# Altium schematic symbol library simple_clock.SCHLIB: 21 symbols
Pins are listed as number, name and electrical type; pins without a type are passive.

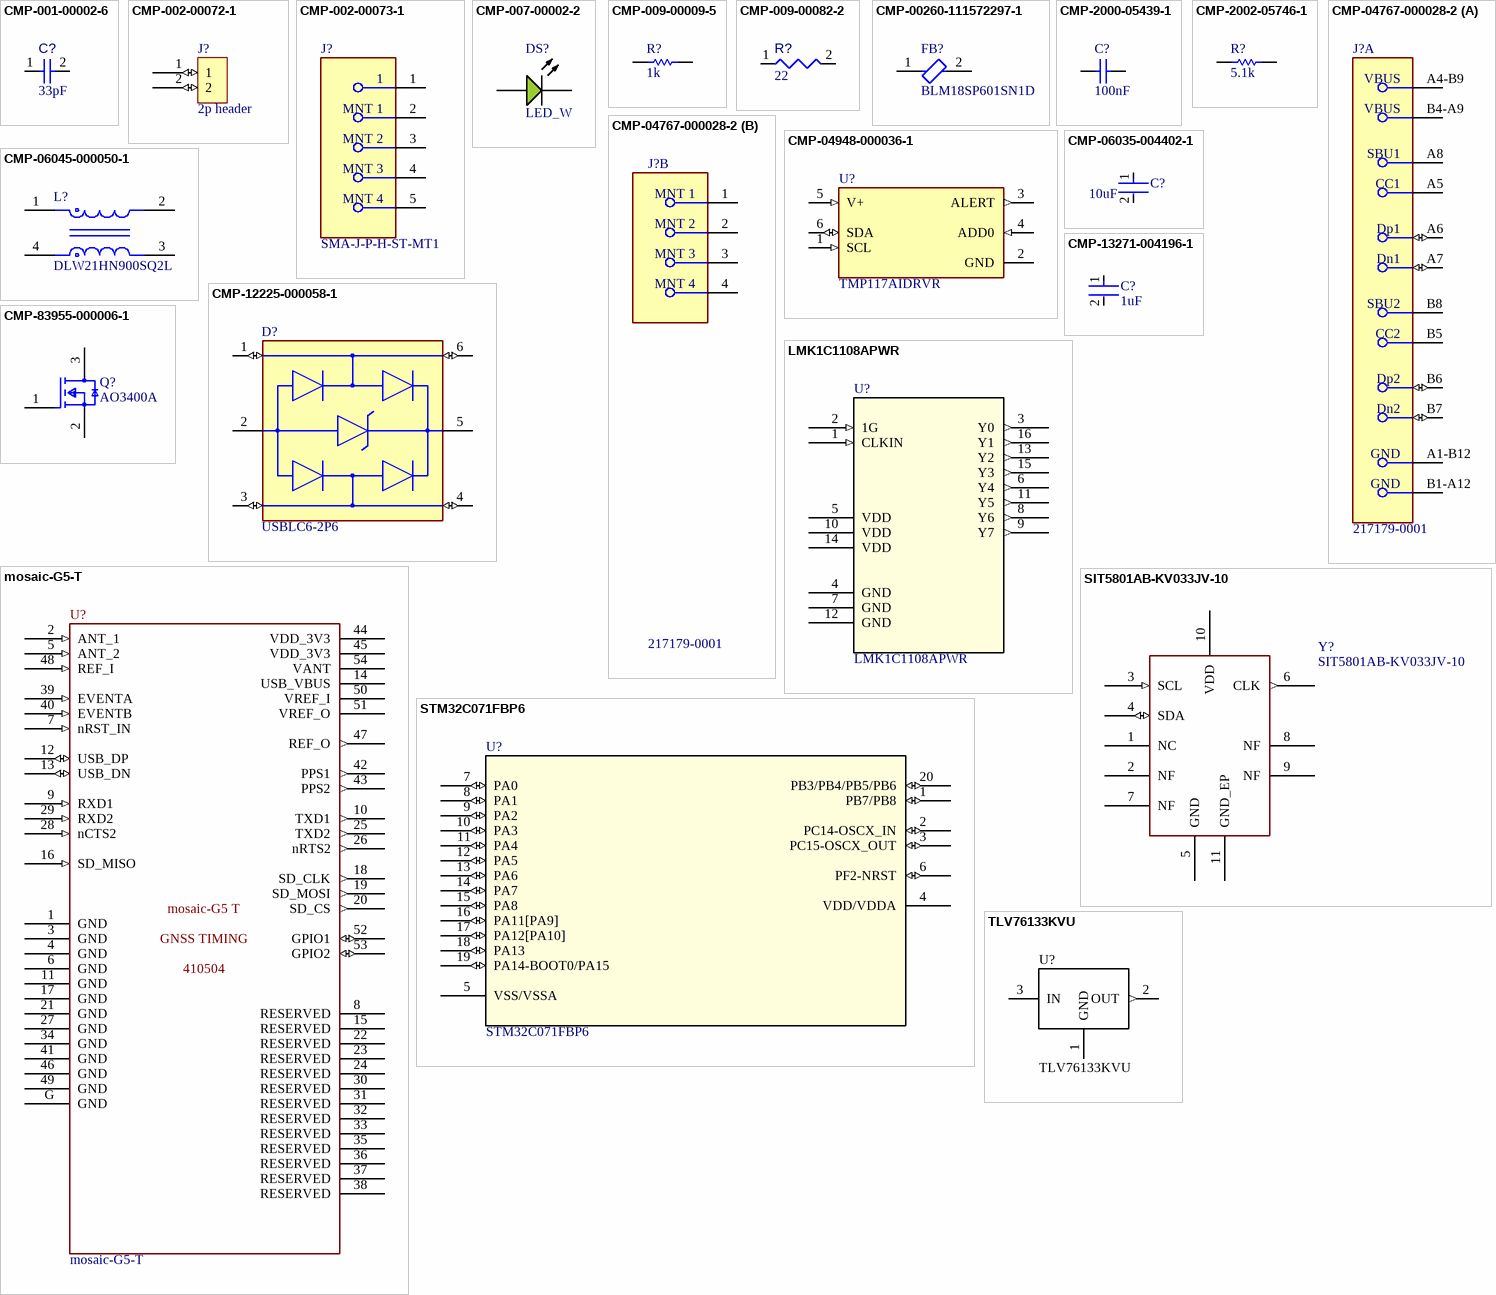
[diagram p0: symbols CMP-001-00002-6 to TLV76133KVU]

## CMP-001-00002-6
designator C?, comment value 33pF  (hidden comment: Capacitor 0.5 pF +/- 0.1pF 25 V 0402)
Voltage Rating: 25V; Tolerance: 20%; Capacitor Type: Ceramic; Max Operating Temperature: 125°C; Case/Package: 0402; Pins: 2; RoHS Compliant: True; Min Operating Temperature: -55°C; Mounting Technology: SM; JLCPCB: C76905
footprint CAPC1005X56X25ML10T15 (Chip Capacitor, 2-Leads, Body 1.10x0.60mm, IPC Low Density)
footprint CAPC1005X56X25NL10T15 (Chip Capacitor, 2-Leads, Body 1.10x0.60mm, IPC Medium Density)
footprint CAPC1005X56X25LL10T15 (Chip Capacitor, 2-Leads, Body 1.10x0.60mm, IPC High Density)
pins: 1, 2

## CMP-002-00072-1
designator J?, comment 2p header
simple 2p header
footprint New footprint 1
pins: 1 (io), 2 (io)

## CMP-002-00073-1
designator J?, comment SMA-J-P-H-ST-MT1
RF Connectors / Coaxial Connectors 6 GHz, 50 Ohm SMA Jack or Plug, Cable Connector; Case/Package: SMA; Mounting Technology: Through Hole
footprint FP-SMA-J-P-H-ST-MT1-MFG
pins: 1, 2 MNT 1, 3 MNT 2, 4 MNT 3, 5 MNT 4

## CMP-007-00002-2
designator DS?, comment LED_W
Chip LED, white; Manufacturer: Everlight Electronics; Forward Voltage: 2V; Lens Style: Clear; Viewing Angle: 120degrees; Colour: Green; Mounting Technology: SM; Datasheet Version: Rev. 1, 04/2006; Package Description: 2-Pin Surface Mount Device, Body 1.6 x 0.8 mm; RoHS Compliant: True; Package Reference: 0603; Pins: 2; Manufacturer URL: http://www.everlight.com/; Datasheet URL: https://datasheet.ciiva.com/48679/19-217-g7c-an1p2-3t-48679179.pdf; Case/Package: 0603; JLCPCB: C2290
footprint EVRL-0603-2_V (SMD, 2-Leads, Body 1.6x0.8mm)
pins: 1 A, 2 K

## CMP-009-00009-5
designator R?, comment value 1k  (hidden comment: Resistor 1k +/-1% 0402 100 mW)
Chip Resistor, 1 KOhm, +/- 1%, 0.1 W, -55 to 155 degC, 0402 (1005 Metric); Power: 100mW; Voltage Rating: 50V; Min Operating Temperature: -55°C; Max Operating Temperature: 155°C; RoHS Compliant: True; Mounting Technology: SM; Pins: 2; Tolerance: 1%; Case/Package: 0402; JLCPCB: C11702
footprint RESC1005X40X25ML05T05 (Chip Resistor, 2-Leads, Body 1.05x0.55mm, IPC Low Density)
footprint RESC1005X40X25NL05T05 (Chip Resistor, 2-Leads, Body 1.05x0.55mm, IPC Medium Density)
footprint RESC1005X40X25LL05T05 (Chip Resistor, 2-Leads, Body 1.05x0.55mm, IPC High Density)
pins: 1, 2

## CMP-009-00082-2
designator R?, comment value 22  (hidden comment: 22R2J)
22R 0.063W 5% 0402 (1005 Metric)  SMD; Power: 63mW; Tolerance: 5%; Case/Package: 0402; Pins: 2; Mounting Technology: SMT; JLCPCB: C25092
footprint RESC0402(1005)_L (Chip Resistor, Body 1.0x0.5mm, IPC High Density)
pins: 1, 2
1 alternate drawing of the same symbol

## CMP-00260-111572297-1
designator FB?, comment BLM18SP601SN1D
BLM18SP601SN1D Ferrite Bead, 600 Ohm, 1.5A, 0603 Rohs Compliant: Yes; NexarPartId: 111572297; Resistance: 140mΩ; Test Frequency: 100MHz; Tolerance: 25%; Height: 950µm; Min Operating Temperature: -55°C; Core Material: Ferrite; Max Operating Temperature: 125°C; Case/Package: 0603; Lifecycle Status: Production; Series Resistance: 140mΩ; RMS Current (Irms): 1.5A; JLCPCB: C3716583
footprint FP-BLM18-0_15-t0_8-MFG (Ferrite Beads Multi-Layer Power 30Ohm 10Ohm 100MHz 6A 0.008Ohm DCR 0603 Automotive T/R)
footprint FP-BLM18-0_15-t0_8-IPC_A (Ferrite Beads Multi-Layer Power 30Ohm 10Ohm 100MHz 6A 0.008Ohm DCR 0603 Automotive T/R)
footprint FP-BLM18-0_15-t0_8-IPC_B (Ferrite Beads Multi-Layer Power 30Ohm 10Ohm 100MHz 6A 0.008Ohm DCR 0603 Automotive T/R)
footprint FP-BLM18-0_15-t0_8-IPC_C (Ferrite Beads Multi-Layer Power 30Ohm 10Ohm 100MHz 6A 0.008Ohm DCR 0603 Automotive T/R)
pins: 1, 2

## CMP-2000-05439-1
designator C?, comment 100nF
Chip Capacitor, 100 nF, +/- 10%, 16 V, -55 to 125 degC, 0402 (1005 Metric), RoHS, Tape and Reel; Manufacturer: Samsung Electro-Mechanics; Capacitance: 100000pF; Dielectric: X7R; Rated Voltage: 16V; Case Size/Dimension: 0402; Tolerance (%): ±10%; Manufacturer URL: http://www.samsungsem.com/global/index.jsp; Datasheet URL: https://datasheet.ciiva.com/29198/458718-da-01-en-vs-kondensator-0402-29198423.pdf; Datasheet Version: Nov-10; JLCPCB: C1525
footprint CAPC1050X55X23ML05T13 (Chip Capacitor, 2-Leads, Body 1.05x0.55mm, IPC Low Density)
footprint CAPC1050X55X23NL05T13 (Chip Capacitor, 2-Leads, Body 1.05x0.55mm, IPC Medium Density)
footprint CAPC1050X55X23LL05T13 (Chip Capacitor, 2-Leads, Body 1.05x0.55mm, IPC High Density)
pins: 1, 2

## CMP-2002-05746-1
designator R?, comment 5.1k
Manufacturer: TE Connectivity / AMP; Part Number: CRG0402F5K1; JLCPCB: C25905
footprint RESC1005X40X25LL10T10 (Chip Resistor, 2-Leads, Body 1.00x0.50mm, IPC High Density)
footprint RESC1005X40X25ML10T10 (Chip Resistor, 2-Leads, Body 1.00x0.50mm, IPC Low Density)
footprint RESC1005X40X25NL10T10 (Chip Resistor, 2-Leads, Body 1.00x0.50mm, IPC Medium Density)
pins: 1, 2
1 alternate drawing of the same symbol

## CMP-04767-000028-2
designator J?, comment 217179-0001
CONN RCP USB2.0 TYP C 16P SMD RA; NexarPartId: 117190526; Gender: Receptacle; Number of Contacts: 16; Current Rating: 1.25A; Voltage Rating: 30V; Min Operating Temperature: -40°C; USB Standard: USB 2.0; Height: 3.36mm; Contact Material: Gold, Nickel; Max Operating Temperature: 85°C; JLCPCB: C3197684
footprint FP-2171790001-MFG (USB Connector, 16 Contact(s), Female, Right Angle, Surface Mount Terminal, Locking, Receptacle)
part A pins: A1-B12 GND (power), A4-B9 VBUS (power), A5 CC1, A6 Dp1 (io), A7 Dn1 (io), A8 SBU1, B1-A12 GND (power), B4-A9 VBUS (power), B5 CC2, B6 Dp2 (io), B7 Dn2 (io), B8 SBU2
part B pins: 1 MNT 1, 2 MNT 2, 3 MNT 3 (power), 4 MNT 4 (power)

## CMP-04948-000036-1
designator U?, comment TMP117AIDRVR
TEMPERATURE SENSOR; Resolution: 16b; Output Type: I2C; Packaging: Cut Tape; Mount: Surface Mount; Min Operating Temperature: -55°C; Max Operating Temperature: 150°C; RoHS Compliant: Yes; JLCPCB: C699536
footprint FP-DRV0006B-IPC_C
footprint FP-DRV0006B-IPC_A
footprint FP-DRV0006B-MFG
footprint FP-DRV0006B-IPC_B
pins: 1 SCL (in), 2 GND (power), 3 ALERT (out), 4 ADD0 (in), 5 V+ (in), 6 SDA (io)

## CMP-06035-004402-1
designator C?, comment 10uF
Chip Multilayer Ceramic Capacitors for General Purpose, 0805, 10uF, X5R, 15%, 10%, 50V; Voltage Rating (DC): 50V; Dielectric: X5R; Tolerance: 10%; Capacitance: 10uF; Thickness: 1.25mm; Length: 2mm; Width: 1.25mm; JLCPCB: C440198
footprint FP-GRM21B-0_2-e0_2_0_7-IPC_A
footprint FP-GRM21B-0_2-e0_2_0_7-MFG
footprint FP-GRM21B-0_2-e0_2_0_7-IPC_B
footprint FP-GRM21B-0_2-e0_2_0_7-IPC_C
pins: 1, 2

## CMP-06045-000050-1
designator L?, comment DLW21HN900SQ2L
CMC 330MA 2LN 90 OHM SMD; Tolerance: 25%; Frequency: 100MHz; Shielding: Unshielded; Impedance: 90R; Number of Lines: 2; DC Resistance (DCR): 350mR; Voltage Rating: 50V; DC Current: 330mA; Current Rating: 330mA; Lead Free: Lead Free; Length: 2mm; Radiation Hardening: No; Max Operating Temperature: 85°C; Depth: 1.2mm; Weight: 0.000317oz; Height: 0.9mm; Termination: SMD/SMT; Min Operating Temperature: -40°C; Case/Package: 0805; Packaging: Tape and Reel; Width: 0.047inch; Test Frequency: 100MHz; Mount: Surface Mount; Current: 330mA; Military Standard: Not; Package Quantity: 1; Resistor Type: Wirewound; Case Code (Imperial): 0805; Max DC Current: 330mA; JLCPCB: C80529
footprint FP-DLW21HN-MFG
pins: 1, 2, 3, 4

## CMP-12225-000058-1
designator D?, comment USBLC6-2P6
TVS DIODE 5.25V 17V SOT666; Min Breakdown Voltage: 6V; Power Line Protection: Yes; Element Configuration: Dual; Test Current: 1mA; Working Voltage: 5V; Number of Channels: 2; Max Reverse Leakage Current: 150nA; Direction: Unidirectional; Peak Pulse Current: 5A; Number of Elements: 1; Capacitance: 3.5pF; Max Breakdown Voltage: 6V; Height: 0.6mm; Depth: 1.3mm; Contact Plating: Tin; Reverse Breakdown Voltage: 6V; REACH SVHC: No SVHC; Operating Supply Voltage: 5V; Width: 1.3mm; Max Operating Temperature: 125°C; Reverse Standoff Voltage: 5V; ESD Protection: Yes; Package Quantity: 1; Termination: SMD/SMT; Length: 1.7mm; Leakage Current: 150nA; Number of Bidirectional Channels: 2; Case/Package: SOT-666; Min Operating Temperature: -40°C; Number of Pins: 6; Clamping Voltage: 17V; Breakdown Voltage: 6V; Lead Free: Lead Free; Radiation Hardening: No; Packaging: Tape and Reel; Mount: Surface Mount; Polarity: Unidirectional; JLCPCB: C15999
footprint FP-SOT-666-MFG
pins: 1 I/O1 (io), 2 GND (power), 3 I/O2 (io), 4 I/O2 (io), 5 VBUS (power), 6 I/O1 (io)

## CMP-13271-004196-1
designator C?, comment 1uF
CL21 Series 0805 1uF 50V ±10% Tolerance X7R Multilayer Ceramic Chip Capacitor; Tolerance: 10%; Thickness: 0.053inch; Case/Package: 0805; Mount: Surface Mount; Depth: 1.25mm; Radiation Hardening: No; Voltage Rating: 50V; Max Operating Temperature: 125°C; Case Code (Imperial): 0805; Min Operating Temperature: -55°C; Length: 0.079inch; Dielectric: X7R; Case Code (Metric): 2012; Packaging: Tape and Reel; Width: 0.049inch; Package Quantity: 1; Capacitance: 1uF; Height: 1.25mm; JLCPCB: C28323
footprint FP-CL21-IPC_C
footprint FP-CL21-IPC_A
footprint FP-CL21-IPC_B
pins: 1, 2

## CMP-83955-000006-1
designator Q?, comment AO3400A
MOSFET N-CH 30V 5.7A SOT23; Input Capacitance: 630pF; Number of Elements: 1; Rds On Max: 26.5mR; Max Power Dissipation: 1.4W; Gate to Source Voltage (Vgs): 12V; Min Operating Temperature: -55°C; Lead Free: Lead Free; Number of Pins: 3; Drain to Source Voltage (Vdss): 30V; Case/Package: SOT-23; Mount: Surface Mount; Continuous Drain Current (ID): 5.7A; Radiation Hardening: No; Packaging: Tape and Reel; Max Operating Temperature: 150°C; Power Dissipation: 1.4W; JLCPCB: C20917
footprint FP-SOT23-MFG
footprint FP-SOT23-IPC_C
footprint FP-SOT23-IPC_B
footprint FP-SOT23-IPC_A
pins: 1 G, 2 S, 3 D

## LMK1C1108APWR
designator U?
1.8V,2.5V or 3.3V asynchronous 8 channel output LVCMOS buffer 16-TSSOP -40 to 125; Manufacturer_Name: Texas Instruments; Copyright: Copyright (C) 2026 Ultra Librarian. All rights reserved.; Manufacturer_Part_Number: LMK1C1108APWR; RefDes: RefDes; Type: Type
footprint TSSOP16_4P5X5P1_TEX
pins: 1 CLKIN (in), 2 1G (in), 3 Y0 (out), 4 GND (power), 5 VDD (power), 6 Y4 (out), 7 GND (power), 8 Y6 (out), 9 Y7 (out), 10 VDD (power), 11 Y5 (out), 12 GND (power), 13 Y2 (out), 14 VDD (power), 15 Y3 (out), 16 Y1 (out)

## mosaic-G5-T
designator U?
Septentrio mosaic-G5 T multi-frequency GNSS timing receiver module, manufacturer part 410504. The 40 internal ground lands are represented by logical pin G and must be tied to ground. Pin 5 (ANT_2) is unsupported on the single-antenna T model and must be left unconnected.
footprint MOSAIC-G5_LGA54_22P8X16P4; pin to pad G>G01
pins: 1 GND (power) "Ground. Connect all GND pins and internal ground lands to the ground plane.", 2 ANT_1 (in) "50-ohm RF input for the main GNSS antenna; carries DC bias supplied through VANT.", 3 GND (power) "Ground. Connect all GND pins and internal ground lands to the ground plane.", 4 GND (power) "Ground. Connect all GND pins and internal ground lands to the ground plane.", 5 ANT_2 (in) "Auxiliary RF input. mosaic-G5 T is single-antenna; leave this pin unconnected.", 6 GND (power) "Ground. Connect all GND pins and internal ground lands to the ground plane.", 7 nRST_IN (in) "Active-low reset input; internally pulled up and debounced.", 8 RESERVED "Reserved; leave unconnected.", 9 RXD1 (in) "UART COM1 receive, 3.3 V LVTTL, internally pulled up.", 10 TXD1 (out) "UART COM1 transmit, 3.3 V LVTTL.", 11 GND (power) "Ground. Connect all GND pins and internal ground lands to the ground plane.", 12 USB_DP (io) "USB 2.0 high-speed data positive.", 13 USB_DN (io) "USB 2.0 high-speed data negative.", 14 USB_VBUS (power) "USB VBUS sense input, 3.0-5.5 V; does not power the module. Leave floating if USB is unused.", 15 RESERVED "Reserved; leave unconnected.", 16 SD_MISO (in) "SPI-mode SD-card MISO/DO, 3.3 V LVTTL, internally pulled up.", 17 GND (power) "Ground. Connect all GND pins and internal ground lands to the ground plane.", 18 SD_CLK (out) "SPI-mode SD-card clock, 3.3 V LVTTL, 25 MHz maximum.", 19 SD_MOSI (out) "SPI-mode SD-card MOSI/DI, 3.3 V LVTTL.", 20 SD_CS (out) "SPI-mode SD-card chip select, 3.3 V LVTTL.", 21 GND (power) "Ground. Connect all GND pins and internal ground lands to the ground plane.", 22 RESERVED "Reserved; leave unconnected.", 23 RESERVED "Reserved; leave unconnected.", 24 RESERVED "Reserved; leave unconnected.", 25 TXD2 (out) "UART COM2 transmit, 3.3 V LVTTL.", 26 nRTS2 (out) "UART COM2 active-low request-to-send output, 3.3 V LVTTL.", 27 GND (power) "Ground. Connect all GND pins and internal ground lands to the ground plane.", 28 nCTS2 (in) "UART COM2 active-low clear-to-send input, 3.3 V LVTTL, internally pulled down.", 29 RXD2 (in) "UART COM2 receive, 3.3 V LVTTL, internally pulled up.", 30 RESERVED "Reserved; leave unconnected.", 31 RESERVED "Reserved; leave unconnected.", 32 RESERVED "Reserved; leave unconnected.", 33 RESERVED "Reserved; leave unconnected.", 34 GND (power) "Ground. Connect all GND pins and internal ground lands to the ground plane.", 35 RESERVED "Reserved; leave unconnected.", 36 RESERVED "Reserved; leave unconnected.", 37 RESERVED "Reserved; leave unconnected.", 38 RESERVED "Reserved; leave unconnected.", 39 EVENTA (in) "External event A or TimeSync input, 3.3 V LVTTL, internally pulled down.", 40 EVENTB (in) "External event B or TimeSync input, 3.3 V LVTTL, internally pulled down.", 41 GND (power) "Ground. Connect all GND pins and internal ground lands to the ground plane.", 42 PPS1 (out) "Programmable PPS output, 3.3 V LVTTL, 8 mA maximum; high impedance during startup.", 43 PPS2 (out) "Programmable PPS output, 3.3 V LVTTL, 8 mA maximum; high impedance during startup.", 44 VDD_3V3 (power) "Main 3.3 V supply input. Tie pins 44 and 45 together.", 45 VDD_3V3 (power) "Main 3.3 V supply input. Tie pins 44 and 45 together.", 46 GND (power) "Ground. Connect all GND pins and internal ground lands to the ground plane.", 47 REF_O (out) "Internal-TCXO reference output, nominally 10 MHz and 1.2 Vpp. Leave open when using REF_I.", 48 REF_I (in) "External 10 MHz reference input, AC-coupled internally, 0.8-1.7 Vpp, 5 kohm in parallel with 10 pF.", 49 GND (power) "Ground. Connect all GND pins and internal ground lands to the ground plane.", 50 VREF_I (power) "2.8 V internal-TCXO supply input. Leave open or tie to ground when using an external reference.", 51 VREF_O (power) "2.8 V internal-TCXO supply output. Only connect to VREF_I; do not power an external load.", 52 GPIO1 (io) "Programmable 3.3 V GPIO, internally pulled up; 16 mA maximum in output mode.", 53 GPIO2 (io) "Programmable 3.3 V GPIO, internally pulled up; 16 mA maximum in output mode.", 54 VANT (power) "3.0-5.5 V active-antenna supply input; combined antenna current limited to 150 mA.", G GND (power) "Forty internal ground lands, mapped to footprint pads G01-G40. Connect to ground."
text: mosaic-G5 T; GNSS TIMING; 410504

## SIT5801AB-KV033JV-10
designator Y?
SiTime SiT5801 10 MHz digitally controlled precision OCXO, exact AB-KV033JV-10 ordering variant; Frequency: 10 MHz; Supply Voltage: 3.3 V; Output: Regulated LVCMOS; Frequency Stability: ±3 ppb; Control Interface: I2C, factory-programmed address code 0; Pull Clamp: ±3.125 ppm; Manufacturer: SiTime; Manufacturer Part Number: SIT5801AB-KV033JV-10; Operating Temperature: -40 to +95 °C; Datasheet: SiT5801 Rev 0.26 (2023-05-04)
footprint SiT5801_K_9x7_LGA11 (SiTime 9 x 7 mm LGA-11 vendor land pattern)
pins: 1 NC "No connect for J pin-1 option; output enable controlled in software", 2 NF "No function", 3 SCL (in) "I2C serial clock", 4 SDA (io) "I2C serial data", 5 GND (power) "Ground", 6 CLK (out) "Regulated LVCMOS 10 MHz output", 7 NF "No function", 8 NF "No function for factory-programmed I2C address option", 9 NF "No function for factory-programmed I2C address option", 10 VDD (power) "3.3 V supply", 11 GND_EP (power) "Exposed/thermal ground pad"

## STM32C071FBP6
designator U?
Mainstream Arm Cortex-M0+ MCU with 128 Kbytes of Flash memory, 24 Kbytes RAM, 48 MHz CPU, 2x USART, timers, ADC, comm. I/F, USB FS, 2-3.6V; Manufacturer_Name: STMicroelectronics; Copyright: Copyright (C) 2026 Ultra Librarian. All rights reserved.; Manufacturer_Part_Number: STM32C071FBP6; Datasheet: https://www.st.com/resource/en/datasheet/stm32c071c8.pdf; RefDes: RefDes; Type: Type
footprint TSSOP20_STM
pins: 1 PB7/PB8 (io), 2 PC14-OSCX_IN (io), 3 PC15-OSCX_OUT (io), 4 VDD/VDDA (power), 5 VSS/VSSA (power), 6 PF2-NRST (io), 7 PA0 (io), 8 PA1 (io), 9 PA2 (io), 10 PA3 (io), 11 PA4 (io), 12 PA5 (io), 13 PA6 (io), 14 PA7 (io), 15 PA8 (io), 16 PA11[PA9] (io), 17 PA12[PA10] (io), 18 PA13 (io), 19 PA14-BOOT0/PA15 (io), 20 PB3/PB4/PB5/PB6 (io)

## TLV76133KVU
designator U?
18 V, 1 A fixed 3.3 V LDO regulator; TI KVU (TO-252); Manufacturer: Texas Instruments; Manufacturer Part Number: TLV76133KVUR; Output Voltage: 3.3 V; Output Current: 1 A; Package: KVU (TO-252-3); Datasheet: https://www.ti.com/lit/gpn/TLV761; Footprint: TO-252-3_KVU_TI_TabPin2; JLCPCB: C41835077
footprint TO-252-3_KVU_TI_TabPin2 (TI KVU0003A TO-252 recommended land pattern; tab mapped to pin 2)
pins: 1 GND (power), 2 OUT (out), 3 IN (power)